# Altium footprint library IC_SMD_DUAL.PcbLib: 184 footprints (part 1 of 12)
Each footprint in its own frame and in the unit in brackets; x right, y up, seen from the top. Pads: shape width x height; smd on the part's side, far side on the other; paste and mask are expansions set on the pad; w line width, h text height; cw(c..) or ccw(c..) is an arc to the next point about the centre after c.
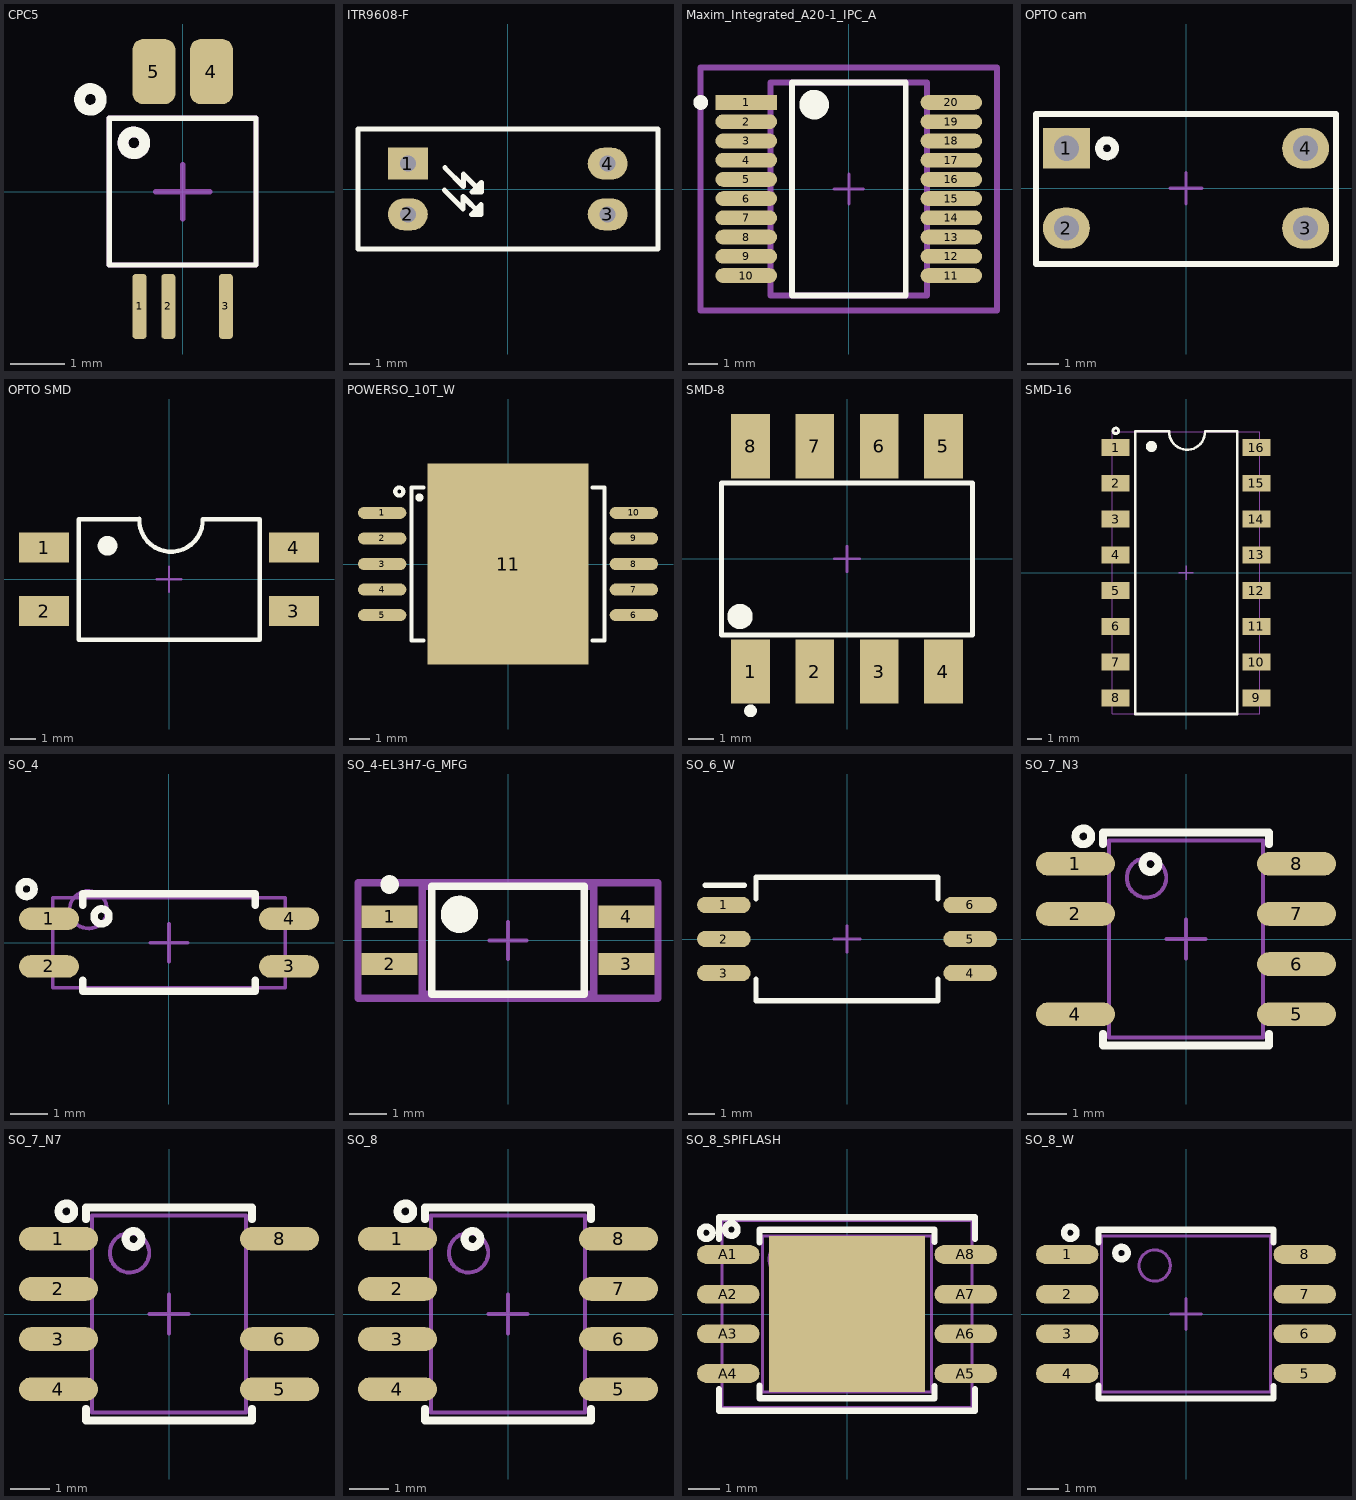
[diagram p0: the footprints below, top view; thin cyan lines are the x and y axes]

## CPC5 [mm]
height 1.8
pads (5):
  rrect50% 0.26x1.2 smd: 1(-0.795,-2.113) 2(-0.265,-2.113) 3(0.795,-2.113)
  rrect50% 0.79x1.2 smd: 4(0.53,2.213) 5(-0.53,2.213)
Top Overlay:
  circle w0.2: c-0.9,0.9 r0.2
  circle w0.2: c-1.7,1.7 r0.2
  lines w0.1: -1.35,-1.35 -1.35,1.35 1.35,1.35 1.35,-1.35 -1.35,-1.35
Top Designator:
  text ".Designator" at -1.852,-0.122 h0.76
Top Component Outline:
  circle w0.2: c-0.9,0.9 r0.2
  lines w0.1: -1.35,-1.35 -1.35,1.35 1.35,1.35 1.35,-1.35 -1.35,-1.35
Top Component Center (Mech8):
  lines w0.1: -0.5,0 0.5,0 ; 0,-0.5 0,0.5
3D body "User Library-XB7608AF.step": height 1.06, standoff -0.03, extent -1.35,-2.081 1.35,2.081

## ITR9608-F [mm] "13x6x10mm (WxLxH)"
pads (4):
  rect 2x1.6 hole 0.8: 1(-5,1.27)
  oval 2x1.6 hole 0.8: 2(-5,-1.27) 3(5,-1.27) 4(5,1.27)
Top Overlay:
  lines w0.254: -3.175,-0.051 -2.235,-0.991 -2.235,-0.381 -1.346,-1.27 ; -3.15,1.067 -2.21,0.127 -2.21,0.737 -1.321,-0.152 ; -1.549,-1.016 -1.803,-1.27 -1.346,-1.27 ; -1.549,-0.991 -1.346,-0.787 -1.346,-1.27 ; -1.524,0.102 -1.778,-0.152 -1.321,-0.152 ; -1.524,0.127 -1.321,0.33 -1.321,-0.152 ; -7.493,-2.997 7.518,-2.997 7.518,2.997 -7.493,2.997 -7.493,-2.997
Top Designator:
  text ".Designator" at -3.698,-0.344 h1.52
3D body "ITR9608.SLDPRT": height 10.2, standoff -2.3, extent -7.489,-3 7.511,3

## Maxim_Integrated_A20-1_IPC_A [mm]
pads (20):
  rect 2.082x0.498 smd paste+0 mask+0: 1(-3.464,2.925)
  rrect100% 2.082x0.498 smd paste+0 mask+0: 2(-3.464,2.275) 3(-3.464,1.625) 4(-3.464,0.975) 5(-3.464,0.325) 6(-3.464,-0.325) 7(-3.464,-0.975) 8(-3.464,-1.625) 9(-3.464,-2.275) 10(-3.464,-2.925) 11(3.464,-2.925) 12(3.464,-2.275) 13(3.464,-1.625) 14(3.464,-0.975) 15(3.464,-0.325) 16(3.464,0.325) 17(3.464,0.975) 18(3.464,1.625) 19(3.464,2.275) 20(3.464,2.925)
Top Overlay:
  circle w0.25: c-5.005,2.925 r0.125
  circle w0.5: c-1.173,2.85 r0.25
  lines w0.2: -1.923,-3.6 -1.923,3.6 1.923,3.6 1.923,-3.6 -1.923,-3.6
Top Designator:
  text ".Designator" at -3.785,-0.344 h1.52
Mechanical 10:
  lines w0.2: -5.005,-4.1 -5.005,4.1 5.005,4.1 5.005,-4.1 -5.005,-4.1
Mechanical 12:
  lines w0.2: -2.645,-3.6 -2.645,3.6 2.645,3.6 2.645,-3.6 -2.645,-3.6
Mechanical 15:
  lines w0.1: -0.5,0 0.5,0 ; 0,-0.5 0,0.5
  lines w0.2: -5.005,-4.1 -5.005,4.1 5.005,4.1 5.005,-4.1 -5.005,-4.1
3D body "IC_Maxim_Integrated_MAX31865AAP+_eec.STEP": height 1.99, standoff 0, extent -3.898,-3.6 3.898,3.6

## OPTO cam [mm]
pads (4):
  rect 1.5x1.3 hole 0.8: 1(-3.81,1.27)
  oval 1.5x1.3 hole 0.8: 2(-3.81,-1.27) 3(3.81,-1.27) 4(3.81,1.27)
Top Overlay:
  circle w0.254: c-2.515,1.27 r0.254
  lines w0.203: -4.775,-2.413 4.775,-2.413 4.775,2.362 -4.775,2.362 -4.775,-2.413
Top Designator:
  text ".Designator" at -3.71,-0.369 h1.52
Mechanical 15:
  lines w0.1: -0.5,0 0.5,0 ; 0,-0.5 0,0.5
3D body "PC817.step": height 4.81, standoff -2.19, extent -3.915,-2.321 3.965,2.27

## OPTO SMD [mm]
pads (4):
  rect 2x1.2 smd: 1(-5,1.27) 2(-5,-1.27) 3(5,-1.27) 4(5,1.27)
Top Overlay:
  circle w0.381: c-2.46,1.346 r0.203
  lines w0.178: -1.19,2.413 -3.603,2.413 -3.603,-2.413 3.636,-2.413 3.636,2.413 1.375,2.413 ; -1.189,2.423 ccw(c0.08,2.38) 1.35,2.413
Top Designator:
  text ".Designator" at -3.71,-0.339 h1.52
Mechanical 15:
  lines w0.1: -0.5,0 0.5,0 ; 0,-0.5 0,0.5
3D body "User Library-PC817_Gullwing.STEP": height 3.95, standoff 0.1, extent -4.92,-2.286 5.08,2.294

## POWERSO_10T_W [mm] "PowerSO-10, 9.4x9.4x3.7mm body 1.27mm pitch"
height 3.7
pads (11):
  oval 2.4x0.6 smd: 1(-6.25,2.54) 2(-6.25,1.27) 3(-6.25,0) 4(-6.25,-1.27) 5(-6.25,-2.54) 6(6.25,-2.54) 7(6.25,-1.27) 8(6.25,0) 9(6.25,1.27) 10(6.25,2.54)
  rect 8x10 smd paste-5: 11(0,0)
Top Overlay:
  circle w0.2: c-4.4,3.3 r0.1
  circle w0.2: c-5.4,3.6 r0.2
  lines w0.2: -4.2,-3.8 -4.8,-3.8 -4.8,3.8 -4.2,3.8 ; 4.2,-3.8 4.8,-3.8 4.8,3.8 4.2,3.8
Top Paste:
  region: 2.5,-2.8 1.5,-2.8 1.5,-3.8 2.5,-3.8
  region: 1.2,-2.8 0.2,-2.8 0.2,-3.8 1.2,-3.8
  region: 3.8,-2.8 2.8,-2.8 2.8,-3.8 3.8,-3.8
  rectangle: -3.8,-3.8 -2.8,-2.8
  rectangle: -1.2,-3.8 -0.2,-2.8
  rectangle: -2.5,-3.8 -1.5,-2.8
  region: 2.5,3.8 1.5,3.8 1.5,2.8 2.5,2.8
  region: 1.2,3.8 0.2,3.8 0.2,2.8 1.2,2.8
  region: 3.8,3.8 2.8,3.8 2.8,2.8 3.8,2.8
  rectangle: -3.8,2.8 -2.8,3.8
  rectangle: -1.2,2.8 -0.2,3.8
  rectangle: -2.5,2.8 -1.5,3.8
  rectangle: -1.2,0.2 -0.2,1.2
  rectangle: -2.5,1.5 -1.5,2.5
  rectangle: -1.2,1.5 -0.2,2.5
  rectangle: -2.5,0.2 -1.5,1.2
  rectangle: -3.8,0.2 -2.8,1.2
  rectangle: -3.8,1.5 -2.8,2.5
  region: 3.8,2.5 2.8,2.5 2.8,1.5 3.8,1.5
  region: 3.8,1.2 2.8,1.2 2.8,0.2 3.8,0.2
  region: 2.5,1.2 1.5,1.2 1.5,0.2 2.5,0.2
  region: 1.2,2.5 0.2,2.5 0.2,1.5 1.2,1.5
  region: 2.5,2.5 1.5,2.5 1.5,1.5 2.5,1.5
  region: 1.2,1.2 0.2,1.2 0.2,0.2 1.2,0.2
  region: 1.2,-0.2 0.2,-0.2 0.2,-1.2 1.2,-1.2
  region: 2.5,-1.5 1.5,-1.5 1.5,-2.5 2.5,-2.5
  region: 1.2,-1.5 0.2,-1.5 0.2,-2.5 1.2,-2.5
  region: 2.5,-0.2 1.5,-0.2 1.5,-1.2 2.5,-1.2
  region: 3.8,-0.2 2.8,-0.2 2.8,-1.2 3.8,-1.2
  region: 3.8,-1.5 2.8,-1.5 2.8,-2.5 3.8,-2.5
  rectangle: -3.8,-2.5 -2.8,-1.5
  rectangle: -3.8,-1.2 -2.8,-0.2
  rectangle: -2.5,-1.2 -1.5,-0.2
  rectangle: -1.2,-2.5 -0.2,-1.5
  rectangle: -2.5,-2.5 -1.5,-1.5
  rectangle: -1.2,-1.2 -0.2,-0.2
Top Designator:
  text ".Designator" at -3.71,-0.344 h1.52
3D body "User Library-POWERSO10.step": height 3.35, standoff 0, extent -6.95,-4.7 6.95,4.7

## SMD-8 [mm]
pads (8):
  rect 1.524x2.54 smd paste+0 mask+0: 1(-3.81,-4.45) 2(-1.27,-4.45) 3(1.27,-4.45) 4(3.81,-4.45) 5(3.81,4.45) 6(1.27,4.45) 7(-1.27,4.45) 8(-3.81,4.45)
Top Overlay:
  circle w0.5: c-4.225,-2.275 r0.25
  circle w0.25: c-3.81,-6 r0.125
  lines w0.2: -4.95,-3 -4.95,3 4.95,3 4.95,-3 -4.95,-3
Top Designator:
  text ".Designator" at -3.71,-0.609 h1.52
Mechanical 15:
  lines w0.1: -0.5,0 0.5,0 ; 0,-0.5 0,0.5
3D body "Trans_Broadcom_6N137-300E_eec.STEP": height 4.46, standoff 0, extent -4.825,-4.825 4.825,4.825

## SMD-16 [mm] "SMD, 16-Leads, Body 19.84x6.5mm, Pitch 2.54mm"
height 4.396
pads (16):
  rect 2x1.2 smd: 1(-5,8.89) 2(-5,6.35) 3(-5,3.81) 4(-5,1.27) 5(-5,-1.27) 6(-5,-3.81) 7(-5,-6.35) 8(-5,-8.89) 9(5,-8.89) 10(5,-6.35) 11(5,-3.81) 12(5,-1.27) 13(5,1.27) 14(5,3.81) 15(5,6.35) 16(5,8.89)
Top Overlay:
  circle w0.381: c-2.46,8.966 r0.203
  circle w0.2: c-4.99,10.07 r0.2
  lines w0.178: -1.19,10.033 -3.603,10.033 -3.603,-10.033 3.636,-10.033 3.636,10.033 1.375,10.033 ; -1.189,10.043 ccw(c0.08,10) 1.35,10.033
Top Designator:
  text ".Designator" at -3.71,-0.22 h1.52
Mechanical 15:
  lines w0.05: -5.25,-10.02 5.25,-10.02 5.25,10.02 -5.25,10.02 -5.25,-10.02
  lines w0.1: -0.5,0 0.5,0 ; 0,-0.5 0,0.5
3D body "DIPSMD16.stp": height 3.85, standoff 0, extent -4.8,-9.92 4.8,9.92

## SO_4 [mm] "SOP-4, 2.6x4.4mm body 1.27mm pitch"
height 2.3
pads (4):
  oval 1.6x0.6 smd: 1(-3.2,0.635) 2(-3.2,-0.635) 3(3.2,-0.635) 4(3.2,0.635)
Top Overlay:
  circle w0.2: c-3.8,1.43 r0.2
  circle w0.2: c-1.8,0.7 r0.2
  lines w0.2: -2.3,-1 -2.3,-1.3 2.3,-1.3 2.3,-1 ; -2.3,1 -2.3,1.3 2.3,1.3 2.3,1
Top Designator:
  text ".Designator" at -3.71,-0.179 h1.52
Mechanical 13:
  circle w0.1: c-2.15,0.88 r0.5
  lines w0.1: -3.1,-1.2 3.1,-1.2 3.1,1.2 -3.1,1.2 -3.1,-1.2
Mechanical 15:
  lines w0.1: -0.5,0 0.5,0 ; 0,-0.5 0,0.5
3D body "CircuitWorks-TLP281.step": height 1.9, standoff 0, extent -3.5,-1.3 3.5,1.3

## SO_4-EL3H7-G_MFG [mm]
pads (4):
  rect 1.5x0.6 smd paste+0 mask+0: 1(-3.175,0.635) 2(-3.175,-0.635) 3(3.175,-0.635) 4(3.175,0.635)
Top Overlay:
  circle w0.25: c-3.175,1.5 r0.125
  circle w0.5: c-1.3,0.7 r0.25
  lines w0.2: -2.05,-1.45 -2.05,1.45 2.05,1.45 2.05,-1.45 -2.05,-1.45
Top Designator:
  text ".Designator" at -3.521,-0.294 h1.52
Mechanical 10:
  lines w0.2: -4.025,-1.55 -4.025,1.55 4.025,1.55 4.025,-1.55 -4.025,-1.55
Mechanical 12:
  lines w0.2: -2.3,-1.45 -2.3,1.45 2.3,1.45 2.3,-1.45 -2.3,-1.45
Mechanical 15:
  lines w0.1: -0.5,0 0.5,0 ; 0,-0.5 0,0.5
  lines w0.2: -4.025,-1.55 -4.025,1.55 4.025,1.55 4.025,-1.55 -4.025,-1.55
3D body "Trans_Everlight_EL3H7_C_TA_-VG_eec.STEP": height 2, standoff 0, extent -3.5,-1.35 3.5,1.35

## SO_6_W [mm] "SOIC6 W, 1.27mm pitch, 6.8x4.5x3.2mm, 11.5mm H"
height 3.2
pads (6):
  oval 2x0.6 smd: 1(-4.6,1.27) 2(-4.6,0) 3(-4.6,-1.27) 4(4.6,-1.27) 5(4.6,0) 6(4.6,1.27)
Top Overlay:
  lines w0.2: -5.3,2 -3.825,2 ; -3.4,-1.5 -3.4,-2.3 3.4,-2.3 3.4,-1.5 ; -3.4,1.5 -3.4,2.3 3.4,2.3 3.4,1.5
Top Designator:
  text ".Designator" at -3.71,-0.344 h1.52
Mechanical 15:
  lines w0.1: -0.5,0 0.5,0 ; 0,-0.5 0,0.5
3D body "FOD8173T.stp": height 3.78, standoff 0, extent -4.85,-2.25 4.85,2.25

## SO_7_N3 [mm] "SOP-8 without pin3, 5x3.9mm body 1.27mm pitch, SOT33-5"
height 1.8
pads (7):
  oval 2x0.6 smd: 1(-2.8,1.905) 2(-2.8,0.635) 4(-2.8,-1.905) 5(2.8,-1.905) 6(2.8,-0.635) 7(2.8,0.635) 8(2.8,1.905)
Top Overlay:
  circle w0.2: c-2.6,2.6 r0.2
  circle w0.2: c-0.9,1.9 r0.2
  lines w0.2: -2.1,-2.4 -2.1,-2.7 2.1,-2.7 2.1,-2.4 ; -2.1,2.4 -2.1,2.7 2.1,2.7 2.1,2.4
Top Designator:
  text ".Designator" at -3.71,-0.294 h1.52
Mechanical 13:
  circle w0.1: c-1,1.55 r0.5
  lines w0.1: -1.95,-2.5 1.95,-2.5 1.95,2.5 -1.95,2.5 -1.95,-2.5
Mechanical 15:
  lines w0.1: -0.5,0 0.5,0 ; 0,-0.5 0,0.5
3D body "SOP-8 without pin3.step": height 1.55, standoff -0.01, extent -2.916,-2.411 3.064,2.489

## SO_7_N7 [mm] "SOP-8 without pin7, 5x3.9mm body 1.27mm pitch, SOP-7"
height 1.8
pads (7):
  oval 2x0.6 smd: 1(-2.8,1.905) 2(-2.8,0.635) 3(-2.8,-0.635) 4(-2.8,-1.905) 5(2.8,-1.905) 6(2.8,-0.635) 8(2.8,1.905)
Top Overlay:
  circle w0.2: c-2.6,2.6 r0.2
  circle w0.2: c-0.9,1.9 r0.2
  lines w0.2: -2.1,-2.4 -2.1,-2.7 2.1,-2.7 2.1,-2.4 ; -2.1,2.4 -2.1,2.7 2.1,2.7 2.1,2.4
Top Designator:
  text ".Designator" at -3.71,-0.294 h1.52
Mechanical 13:
  circle w0.1: c-1,1.55 r0.5
  lines w0.1: -1.95,-2.5 1.95,-2.5 1.95,2.5 -1.95,2.5 -1.95,-2.5
Mechanical 15:
  lines w0.1: -0.5,0 0.5,0 ; 0,-0.5 0,0.5
3D body "User Library-SOP7.step": height 1.76, standoff 0, extent -3.126,-2.532 3.126,2.532

## SO_8 [mm] "SOP-8, 5x3.9mm body 1.27mm pitch, SOT96-1, M08A, S8, SOIC8, VO8, MS-012AA(JEDEC), R-8, 8S2, VOG8"
height 1.8
pads (8):
  oval 2x0.6 smd: 1(-2.8,1.905) 2(-2.8,0.635) 3(-2.8,-0.635) 4(-2.8,-1.905) 5(2.8,-1.905) 6(2.8,-0.635) 7(2.8,0.635) 8(2.8,1.905)
Top Overlay:
  circle w0.2: c-2.6,2.6 r0.2
  circle w0.2: c-0.9,1.9 r0.2
  lines w0.2: -2.1,-2.4 -2.1,-2.7 2.1,-2.7 2.1,-2.4 ; -2.1,2.4 -2.1,2.7 2.1,2.7 2.1,2.4
Top Designator:
  text ".Designator" at -3.71,-0.294 h1.52
Mechanical 13:
  circle w0.1: c-1,1.55 r0.5
  lines w0.1: -1.95,-2.5 1.95,-2.5 1.95,2.5 -1.95,2.5 -1.95,-2.5
Mechanical 15:
  lines w0.1: -0.5,0 0.5,0 ; 0,-0.5 0,0.5
3D body "User Library-so8-3.step": height 1.7, standoff 0, extent -3,-2.45 3,2.45

## SO_8_SPIFLASH [mm] "SOP-8 WIDE + SON-8 6X8 combine"
pads (9):
  oval 2x0.6 smd: A1(-3.8,1.905) A2(-3.8,0.635) A3(-3.8,-0.635) A4(-3.8,-1.905) A5(3.8,-1.905) A6(3.8,-0.635) A7(3.8,0.635) A8(3.8,1.905)
  rect 5x5 smd: ""(0,0)
Top Overlay:
  circle w0.2: c-4.5,2.6 r0.2
  circle w0.2: c-3.7,2.7 r0.2
  lines w0.2: -4.1,-2.4 -4.1,-3.1 4.1,-3.1 4.1,-2.4 ; -4.1,2.4 -4.1,3.1 4.1,3.1 4.1,2.4 ; -2.8,-2.3 -2.8,-2.7 2.8,-2.7 2.8,-2.3 ; -2.8,2.3 -2.8,2.7 2.8,2.7 2.8,2.3
Top Designator:
  text ".Designator" at -3.71,-0.344 h1.52
Mechanical 13:
  circle w0.1: c-2,1.75 r0.5
  lines w0.1: -4,-3 -4,3 4,3 4,-3 -4,-3 ; -2.7,-2.5 -2.7,2.5 2.7,2.5 2.7,-2.5 -2.7,-2.5
3D body "User Library-WSON-8_6x8mm.STEP": height 0.81, standoff -0.07, extent -4,-3 4,3
3D body "User Library-SOIC8_Wide_5mmx5mm.step": height 1.75, standoff -0.01, extent -4.052,-2.73 4.05,2.73

## SO_8_W [mm] "SOIC Width, 5x5.3mm body 1.27mm pitch, 5.28mm SOIJ"
pads (8):
  oval 2x0.6 smd: 1(-3.8,1.905) 2(-3.8,0.635) 3(-3.8,-0.635) 4(-3.8,-1.905) 5(3.8,-1.905) 6(3.8,-0.635) 7(3.8,0.635) 8(3.8,1.905)
Top Overlay:
  circle w0.2: c-3.7,2.6 r0.2
  circle w0.2: c-2.064,1.95 r0.2
  lines w0.2: -2.8,-2.3 -2.8,-2.7 2.8,-2.7 2.8,-2.3 ; -2.8,2.3 -2.8,2.7 2.8,2.7 2.8,2.3
Top Designator:
  text ".Designator" at -3.71,-0.294 h1.52
Mechanical 13:
  circle w0.1: c-1,1.55 r0.5
  lines w0.1: -2.7,-2.5 2.7,-2.5 2.7,2.5 -2.7,2.5 -2.7,-2.5
Mechanical 15:
  lines w0.1: -0.5,0 0.5,0 ; 0,-0.5 0,0.5
3D body "User Library-SOIC8_Wide_5mmx5mm.step": height 1.75, standoff -0.01, extent -4.052,-2.73 4.05,2.73